# Altium integrated library Integrated_Library1.IntLib: 3 symbols
Pins are listed as number, name and electrical type; pins without a type are passive.

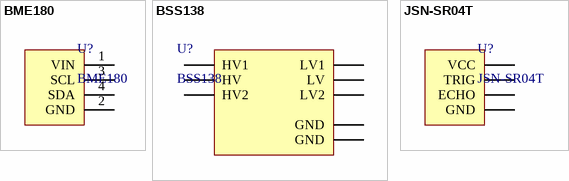
[diagram p0: symbols BME180 to JSN-SR04T]

## BME180
designator U?
temp sensor
pins: 1 VIN, 2 GND, 3 SCL, 4 SDA

## BSS138
designator U?
Logic Converter
pins: 1 HV1, 2 HV, 3 GND, 4 HV2, 5 LV1, 6 LV, 7 GND, 8 LV2

## JSN-SR04T
designator U?
pins: 1 VCC, 2 TRIG, 3 ECHO, 4 GND